# Altium schematic symbol library LM4040BIM3-2.5_NOPB.SchLib: 1 symbol
Pins are listed as number, name and electrical type; pins without a type are passive.

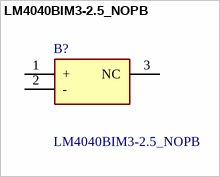
[diagram p0: symbol LM4040BIM3-2.5_NOPB]

## LM4040BIM3-2.5_NOPB
designator B?
100-ppm/C precision micropower shunt voltage reference; Manufacturer_Name: Texas Instruments; Manufacturer_Part_Number: LM4040BIM3-2.5/NOPB; Geometry.Height: 1.12mm; Mouser Part Number: 926-LM4040BIM325NOPB; Mouser Price/Stock: https://www.mouser.co.uk/ProductDetail/Texas-Instruments/LM4040BIM3-2.5-NOPB?qs=QbsRYf82W3GDmxxHwxXlYw%3D%3D; Arrow Part Number: LM4040BIM3-2.5/NOPB; Arrow Price/Stock: https://www.arrow.com/en/products/lm4040bim3-2.5nopb/texas-instruments; Datasheet Link: https://datasheet.datasheetarchive.com/originals/distributors/Datasheets-DGA16/867642.pdf
footprint SOT95P237X112-3N
pins: 1 +, 2 -, 3 NC